# Altium footprint library ADS131M08IPBS.PcbLib: 3 footprints
Each footprint in its own frame and in the unit in brackets; x right, y up, seen from the top. Pads: shape width x height; smd on the part's side, far side on the other; paste and mask are expansions set on the pad; w line width, h text height; cw(c..) or ccw(c..) is an arc to the next point about the centre after c.
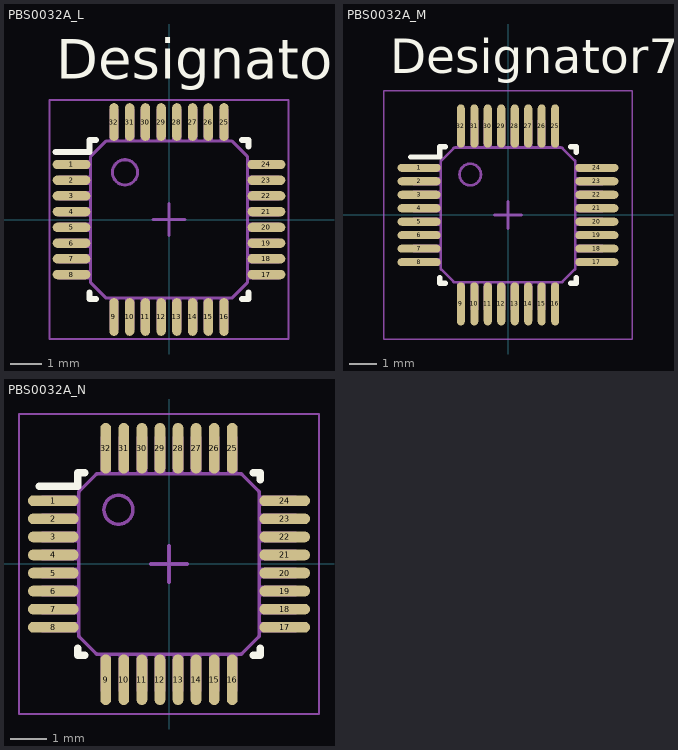
[diagram p0: the footprints below, top view; thin cyan lines are the x and y axes]

## PBS0032A_L [mm]
pads (32):
  oval 1.2x0.3 smd paste+0 mask+0.051: 1(-3.1,1.75) 2(-3.1,1.25) 3(-3.1,0.75) 4(-3.1,0.25) 5(-3.1,-0.25) 6(-3.1,-0.75) 7(-3.1,-1.25) 8(-3.1,-1.75) 17(3.1,-1.75) 18(3.1,-1.25) 19(3.1,-0.75) 20(3.1,-0.25) 21(3.1,0.25) 22(3.1,0.75) 23(3.1,1.25) 24(3.1,1.75)
  oval 0.3x1.2 smd paste+0 mask+0.051: 9(-1.75,-3.1) 10(-1.25,-3.1) 11(-0.75,-3.1) 12(-0.25,-3.1) 13(0.25,-3.1) 14(0.75,-3.1) 15(1.25,-3.1) 16(1.75,-3.1) 25(1.75,3.1) 26(1.25,3.1) 27(0.75,3.1) 28(0.25,3.1) 29(-0.25,3.1) 30(-0.75,3.1) 31(-1.25,3.1) 32(-1.75,3.1)
Top Overlay:
  lines w0.2: -3.6,2.15 -2.527,2.15 -2.527,2.527 -2.327,2.527 ; -2.527,-2.327 -2.527,-2.527 -2.327,-2.527 ; 2.327,-2.527 2.527,-2.527 2.527,-2.327 ; 2.327,2.527 2.527,2.527 2.527,2.327
  text "Designator762" at -3.581,4.47 h1.27
  text ".Designator" at -3.492,-0.635 h1.27
Mechanical 13:
  drawing of 418 lines, arcs and shapes, not listed
  text ".Designator" at -3.492,-0.635 h1.27
Mechanical 15:
  lines w0.05: -3.8,-3.8 -3.8,3.8 3.8,3.8 3.8,-3.8 -3.8,-3.8
  lines w0.1: -0.5,0 0.5,0 ; 0,-0.5 0,0.5

## PBS0032A_M [mm]
pads (32):
  oval 1.6x0.3 smd paste+0 mask+0.051: 1(-3.3,1.75) 2(-3.3,1.25) 3(-3.3,0.75) 4(-3.3,0.25) 5(-3.3,-0.25) 6(-3.3,-0.75) 7(-3.3,-1.25) 8(-3.3,-1.75) 17(3.3,-1.75) 18(3.3,-1.25) 19(3.3,-0.75) 20(3.3,-0.25) 21(3.3,0.25) 22(3.3,0.75) 23(3.3,1.25) 24(3.3,1.75)
  oval 0.3x1.6 smd paste+0 mask+0.051: 9(-1.75,-3.3) 10(-1.25,-3.3) 11(-0.75,-3.3) 12(-0.25,-3.3) 13(0.25,-3.3) 14(0.75,-3.3) 15(1.25,-3.3) 16(1.75,-3.3) 25(1.75,3.3) 26(1.25,3.3) 27(0.75,3.3) 28(0.25,3.3) 29(-0.25,3.3) 30(-0.75,3.3) 31(-1.25,3.3) 32(-1.75,3.3)
Top Overlay:
  lines w0.2: -3.6,2.15 -2.527,2.15 -2.527,2.527 -2.327,2.527 ; -2.527,-2.327 -2.527,-2.527 -2.327,-2.527 ; 2.327,-2.527 2.527,-2.527 2.527,-2.327 ; 2.327,2.527 2.527,2.527 2.527,2.327
  text "Designator763" at -4.369,5.258 h1.27
  text ".Designator" at -3.492,-0.635 h1.27
Mechanical 13:
  drawing of 418 lines, arcs and shapes, not listed
  text ".Designator" at -3.492,-0.635 h1.27
Mechanical 15:
  lines w0.05: -4.6,-4.6 -4.6,4.6 4.6,4.6 4.6,-4.6 -4.6,-4.6
  lines w0.1: -0.5,0 0.5,0 ; 0,-0.5 0,0.5

## PBS0032A_N [mm]
pads (32):
  oval 1.4x0.3 smd paste+0 mask+0.051: 1(-3.2,1.75) 2(-3.2,1.25) 3(-3.2,0.75) 4(-3.2,0.25) 5(-3.2,-0.25) 6(-3.2,-0.75) 7(-3.2,-1.25) 8(-3.2,-1.75) 17(3.2,-1.75) 18(3.2,-1.25) 19(3.2,-0.75) 20(3.2,-0.25) 21(3.2,0.25) 22(3.2,0.75) 23(3.2,1.25) 24(3.2,1.75)
  oval 0.3x1.4 smd paste+0 mask+0.051: 9(-1.75,-3.2) 10(-1.25,-3.2) 11(-0.75,-3.2) 12(-0.25,-3.2) 13(0.25,-3.2) 14(0.75,-3.2) 15(1.25,-3.2) 16(1.75,-3.2) 25(1.75,3.2) 26(1.25,3.2) 27(0.75,3.2) 28(0.25,3.2) 29(-0.25,3.2) 30(-0.75,3.2) 31(-1.25,3.2) 32(-1.75,3.2)
Top Overlay:
  lines w0.2: -3.6,2.15 -2.527,2.15 -2.527,2.527 -2.327,2.527 ; -2.527,-2.327 -2.527,-2.527 -2.327,-2.527 ; 2.327,-2.527 2.527,-2.527 2.527,-2.327 ; 2.327,2.527 2.527,2.527 2.527,2.327
  text ".Designator" at -3.492,-0.635 h1.27
Mechanical 13:
  drawing of 418 lines, arcs and shapes, not listed
  text ".Designator" at -3.492,-0.635 h1.27
Mechanical 15:
  lines w0.05: -4.15,-4.15 4.15,-4.15 4.15,4.15 -4.15,4.15 -4.15,-4.15
  lines w0.1: -0.5,0 0.5,0 ; 0,-0.5 0,0.5